# Altium footprint library PcbLib1.PcbLib: 18 footprints (part 2 of 2)
Each footprint in its own frame and in the unit in brackets; x right, y up, seen from the top. Pads: shape width x height; smd on the part's side, far side on the other; paste and mask are expansions set on the pad; w line width, h text height; cw(c..) or ccw(c..) is an arc to the next point about the centre after c.
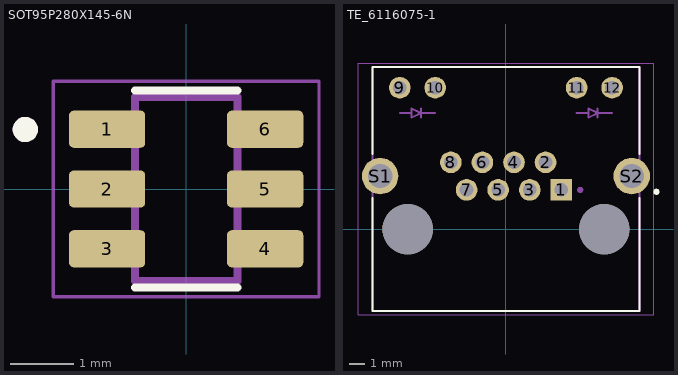
[diagram p1: the footprints below, top view; thin cyan lines are the x and y axes]

## SOT95P280X145-6N [mm]
pads (6):
  rrect25% 1.21x0.59 smd: 1(-1.255,0.95) 2(-1.255,0) 3(-1.255,-0.95) 4(1.255,-0.95) 5(1.255,0) 6(1.255,0.95)
Top Overlay:
  circle w0.2: c-2.555,0.945 r0.1
  lines w0.127: -0.813,-1.565 0.813,-1.565 ; -0.813,1.565 0.813,1.565
Mechanical 13:
  circle w0.2: c-2.555,0.945 r0.1
  lines w0.127: -0.813,-1.462 -0.813,1.462 0.813,1.462 0.813,-1.462 -0.813,-1.462
Mechanical 15:
  lines w0.05: -2.11,-1.713 2.11,-1.713 2.11,1.713 -2.11,1.713 -2.11,-1.713
3D body "step_temp.STEP": height 0.4, standoff -1.05, extent -1.4,-1.462 1.4,1.462

## TE_6116075-1 [mm]
pads (16):
  rect 1.398x1.398 hole 0.89: 1(3.58,2.54)
  round 1.398 hole 0.89: 2(2.56,4.32) 3(1.54,2.54) 4(0.52,4.32) 5(-0.5,2.54) 6(-1.52,4.32) 7(-2.54,2.54) 8(-3.56,4.32) 9(-6.86,9.14) 10(-4.57,9.14) 11(4.57,9.14) 12(6.86,9.14)
  round 2.355 hole 1.57: S1(-8.13,3.43) S2(8.13,3.43)
  round 3.25 hole 3.25 unplated: ""(-6.35,0) ""(6.35,0)
Top Overlay:
  circle w0.2: c9.727,2.413 r0.1
  lines w0.127: -8.635,2.02 -8.635,-5.28 8.635,-5.28 8.635,2.02 ; -8.635,4.84 -8.635,10.47 8.635,10.47 8.635,4.84
Mechanical 13:
  circle w0.2: c4.8,2.54 r0.1
  lines w0.127: -6.86,7.5 -6.1,7.5 ; -5.5,7.2 -5.5,7.5 ; -5.5,7.8 -5.5,7.5 ; -4.57,7.5 -5.5,7.5 ; 4.57,7.5 5.33,7.5 ; 5.93,7.2 5.93,7.5 ; 5.93,7.8 5.93,7.5 ; 6.86,7.5 5.93,7.5 ; -6.1,7.5 -6.1,7.2 -5.5,7.5 ; -6.1,7.5 -6.1,7.8 -5.5,7.5 ; 5.33,7.5 5.33,7.2 5.93,7.5 ; 5.33,7.5 5.33,7.8 5.93,7.5 ; -8.635,-5.28 8.635,-5.28 8.635,10.47 -8.635,10.47 -8.635,-5.28
Mechanical 15:
  lines w0.05: -9.56,-5.53 9.56,-5.53 9.56,10.72 -9.56,10.72 -9.56,-5.53